# Altium schematic symbol library 1812CS-333XJLB.SchLib: 1 symbol
Pins are listed as number, name and electrical type; pins without a type are passive.

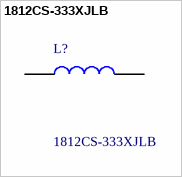
[diagram p0: symbol 1812CS-333XJLB]

## 1812CS-333XJLB
designator L?
Fixed Inductors 1812CS AEC-Q200 33 uH 5 % 0.15 A; Manufacturer_Name: COILCRAFT; Geometry.Height: 3.43mm; Mouser Part Number: 994-1812CS-333XJLB; Mouser Price/Stock: https://www.mouser.com/Search/Refine.aspx?Keyword=994-1812CS-333XJLB; Manufacturer_Part_Number: 1812CS-333XJLB; Datasheet Link: https://componentsearchengine.com/Datasheets/1/1812CS-333XJLB.pdf
footprint INDC5038X343N
pins: 1, 2